# Altium schematic symbol library CC0805CRNPO0BN4R7.SchLib: 1 symbol
Pins are listed as number, name and electrical type; pins without a type are passive.

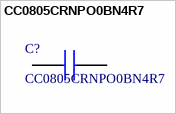
[diagram p0: symbol CC0805CRNPO0BN4R7]

## CC0805CRNPO0BN4R7
designator C?
4.7 pF ±0.25pF 100V Ceramic Capacitor C0G, NP0 0805 (2012 Metric); Manufacturer_Name: Yageo; Copyright: Copyright (C) 2026 Ultra Librarian. All rights reserved.; Manufacturer_Part_Number: CC0805CRNPO0BN4R7
footprint CAP_CC0805_YAG
pins: 1, 2